# EAGLE library part IS31FL3254-QFLS4-TR (library IS31FL3254-QFLS4-TR)
24-CHANNEL LED DRIVER, QFN-32, 4mm4mm, T&R Source: Datasheet <https://www.lumissil.com/assets/pdf/core/IS31FL3254_DS.pdf>
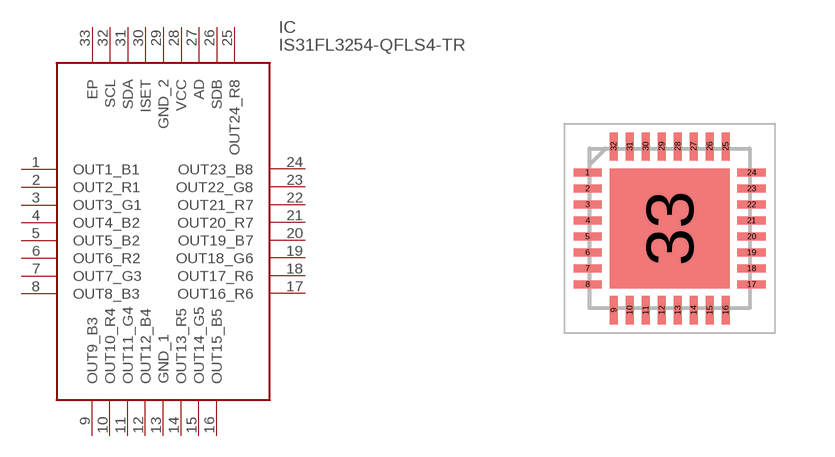
[diagram p0: symbol with the pads of QFN40P400X400X80-33N; footprint QFN40P400X400X80-33N]

Designator prefix IC

## IS31FL3254-QFLS4-TR (Arrow_Part_Number: IS31FL3254-QFLS4-TR; Arrow_Price-Stock: https://www.arrow.com/en/products/is31fl3254-qfls4-tr/lumissil-microsystems.html?utm_currency=USD&region=nac; Description: 24-CHANNEL LED DRIVER, QFN-32, 4mm4mm, T&R; Height: 0.8mm; Manufacturer_Name: Lumissil Microsystems; Manufacturer_Part_Number: IS31FL3254-QFLS4-TR)  [QFN40P400X400X80-33N]
1  OUT1_B1
2  OUT2_R1
3  OUT3_G1
4  OUT4_B2
5  OUT5_B2
6  OUT6_R2
7  OUT7_G3
8  OUT8_B3
9  OUT9_B3
10  OUT10_R4
11  OUT11_G4
12  OUT12_B4
13  GND_1
14  OUT13_R5
15  OUT14_G5
16  OUT15_B5
17  OUT16_R6
18  OUT17_R6
19  OUT18_G6
20  OUT19_B7
21  OUT20_R7
22  OUT21_R7
23  OUT22_G8
24  OUT23_B8
25  OUT24_R8
26  SDB
27  AD
28  VCC
29  GND_2
30  ISET
31  SDA
32  SCL
33  EP

## Footprint QFN40P400X400X80-33N (pad centres in mm)
QFN-32, Lead-free_2024-1
smd 0.7 x 0.2: 1 -2.05,1.4; 2 -2.05,1; 3 -2.05,0.6; 4 -2.05,0.2; 5 -2.05,-0.2; 6 -2.05,-0.6; 7 -2.05,-1; 8 -2.05,-1.4; 17 2.05,-1.4; 18 2.05,-1; 19 2.05,-0.6; 20 2.05,-0.2; 21 2.05,0.2; 22 2.05,0.6; 23 2.05,1; 24 2.05,1.4
smd 0.2 x 0.7: 9 -1.4,-2.05; 10 -1,-2.05; 11 -0.6,-2.05; 12 -0.2,-2.05; 13 0.2,-2.05; 14 0.6,-2.05; 15 1,-2.05; 16 1.4,-2.05; 25 1.4,2.05; 26 1,2.05; 27 0.6,2.05; 28 0.2,2.05; 29 -0.2,2.05; 30 -0.6,2.05; 31 -1,2.05; 32 -1.4,2.05
smd 3 x 3: 33 0,0